# Altium integrated library Tantalium Capacitor 2312 220uF.IntLib: 1 symbol
Pins are listed as number, name and electrical type; pins without a type are passive.

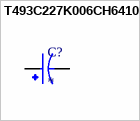
[diagram p0: symbol T493C227K006CH6410]

## T493C227K006CH6410
designator C?
220 ÂµF Molded Tantalum Capacitors 6.3 V 2312 (6032 Metric) 1.2Ohm @ 100kHz; MF: Kemet; MP: T493C227K006CH6410; SnapEDA_Link: https://www.snapeda.com/parts/T493C227K006CH6410/Kemet/view-part/?ref=snap; Package: SMD-2 Kemet; Value: *; Check_prices: https://www.snapeda.com/parts/T493C227K006CH6410/Kemet/view-part/?ref=eda
footprint CAPPM6032X280N
pins: 1, 2